# Altium footprint library LED-Optocupler$.PcbLib: 72 footprints (part 5 of 5)
Each footprint in its own frame and in the unit in brackets; x right, y up, seen from the top. Pads: shape width x height; smd on the part's side, far side on the other; paste and mask are expansions set on the pad; w line width, h text height; cw(c..) or ccw(c..) is an arc to the next point about the centre after c.
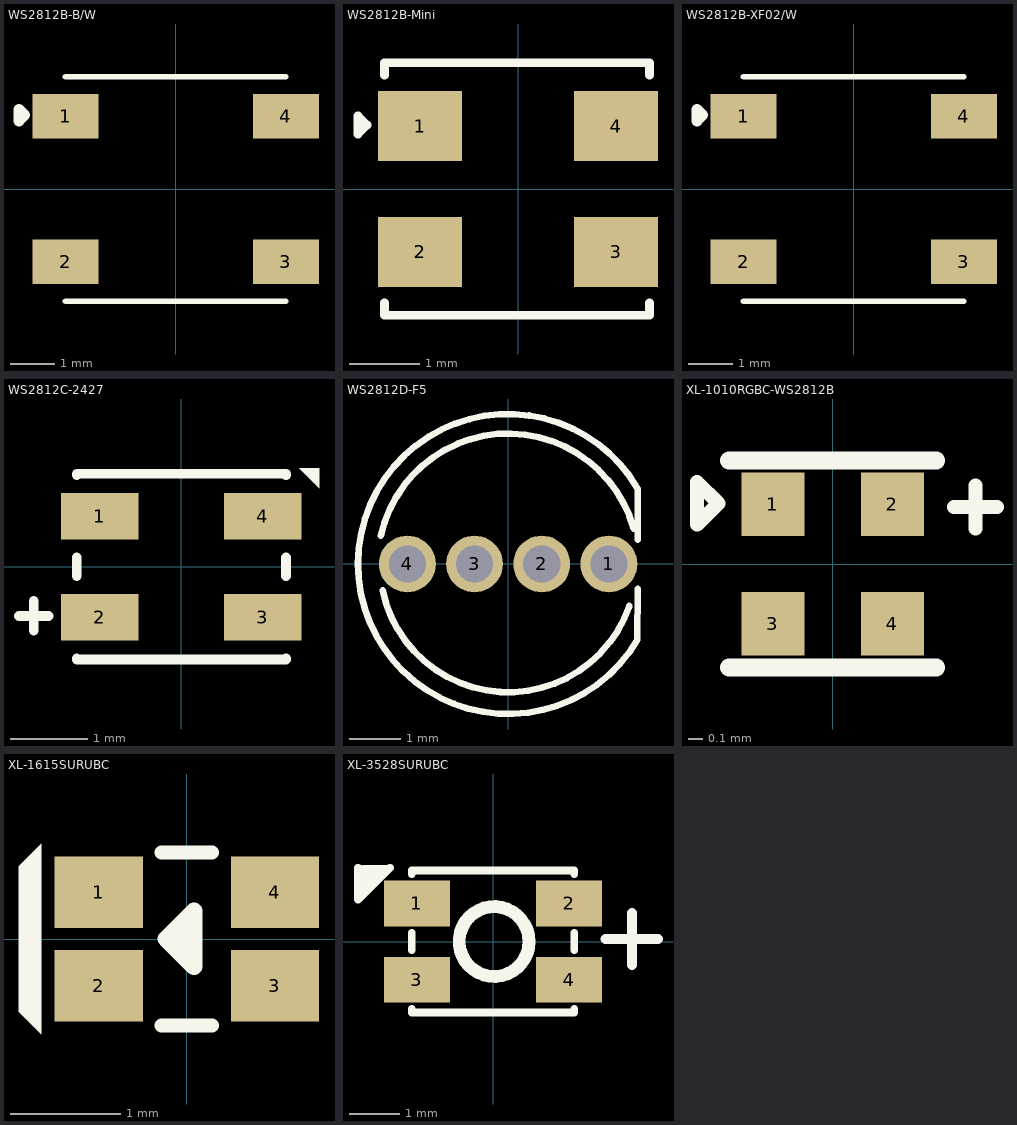
[diagram p4: the footprints below, top view; thin cyan lines are the x and y axes]

## WS2812B-B/W [mm]
pads (4):
  rect 1.5x1 smd: 1(-2.5,1.65) 2(-2.5,-1.65) 3(2.5,-1.65) 4(2.5,1.65)
Top Overlay:
  lines w0.127: -2.5,-2.551 2.5,-2.551 ; -2.5,2.551 2.5,2.551
  lines w0.254: -3.556,1.549 -3.429,1.676 -3.556,1.803 -3.556,1.549
3D body "WS2812B-BW.STEP": height 1.55, standoff -0.02, extent -2.7,-2.5 2.7,2.5

## WS2812B-Mini [mm] "SMD,3.5x3.5mm Light Emitting Diodes (LED) RoHS"
pads (4):
  rect 1.2x1 smd: 1(-1.4,0.9) 2(-1.4,-0.9) 3(1.4,-0.9) 4(1.4,0.9)
Top Overlay:
  lines w0.127: -1.905,-1.626 -1.905,-1.803 1.88,-1.803 1.88,-1.626 ; -1.905,1.626 -1.905,1.803 1.88,1.803 1.88,1.626 ; -2.286,0.787 -2.159,0.914 -2.286,1.041 -2.286,0.787
3D body "SMD WS2812B Mini.step": height 1.95, standoff 0, extent -1.84,-1.74 1.84,1.74

## WS2812B-XF02/W [mm]
pads (4):
  rect 1.5x1 smd: 1(-2.5,1.65) 2(-2.5,-1.65) 3(2.5,-1.65) 4(2.5,1.65)
Top Overlay:
  lines w0.127: -2.5,-2.551 2.5,-2.551 ; -2.5,2.551 2.5,2.551
  lines w0.254: -3.556,1.549 -3.556,1.803 -3.429,1.676 -3.556,1.549
3D body "WS2812B-BW.STEP": height 1.55, standoff -0.02, extent -2.7,-2.5 2.7,2.5

## WS2812C-2427 [mm]
pads (4):
  rect 1x0.6 smd paste+0 mask+0.051: 1(-1.05,0.65) 2(-1.05,-0.65) 3(1.05,-0.65) 4(1.05,0.65)
Top Overlay:
  region: 1.524,1.27 1.778,1.27 1.778,1.016
  lines w0.127: -2.095,-0.635 -1.714,-0.635 ; -1.905,-0.826 -1.905,-0.445 ; -1.35,-1.181 -1.35,-1.2 1.35,-1.2 1.35,-1.181 ; -1.35,-0.119 -1.35,0.119 ; -1.35,1.181 -1.35,1.2 1.35,1.2 1.35,1.181 ; 1.35,-0.119 1.35,0.119
3D body "C4154872.step": height 1.12, standoff 0, extent -1.35,-1.204 1.35,1.204

## WS2812D-F5 [mm]
pads (4):
  round 1.1 hole 0.72 paste+0 mask+0.051: 1(1.95,0) 2(0.65,0) 3(-0.65,0) 4(-1.95,0)
Top Overlay:
  lines w0.127: -2.464,0.543 cw(c0,0) 2.43,0.68 ; -2.43,-0.51 ccw(c0,0) 2.347,-0.811 ; 2.504,-0.476 2.5,-1.471 cw(c-0.003,-0.001) 2.511,1.45 2.507,0.472
3D body "C190565.step": height 8.7, standoff -3.5, extent -2.9,-2.9 2.51,2.9

## XL-1010RGBC-WS2812B [mm]
pads (4):
  rect 0.45x0.45 smd: 1(-0.425,0.425) 2(0.425,0.425) 3(-0.425,-0.425) 4(0.425,-0.425)
Top Overlay:
  lines w0.1: 0.864,0.406 1.168,0.406 ; 1.016,0.254 1.016,0.559 ; -0.965,0.279 -0.965,0.584 -0.813,0.432 -0.965,0.279
  lines w0.127: -0.737,-0.737 0.737,-0.737 ; -0.737,0.737 0.737,0.737
3D body "XL-1010RGBC-WS2812B.STEP": height 0.81, standoff 0, extent -0.5,-0.501 0.5,0.5

## XL-1615SURUBC [mm]
pads (4):
  rect 0.8x0.65 smd: 1(-0.8,0.425) 2(-0.8,-0.425) 3(0.8,-0.425) 4(0.8,0.425)
Top Overlay:
  region: 0.064,0.128 0.064,-0.252 -0.19,0.002
  region: -1.321,0.864 -1.524,0.66 -1.524,-0.66 -1.321,-0.864
  lines w0.127: -0.229,-0.787 0.229,-0.787 ; -0.229,0.787 0.229,0.787
  lines w0.152: -0.19,0.002 0.064,0.256 0.064,0.002 0.064,-0.252 -0.19,0.002
3D body "C965836.step": height 0.59, standoff 0, extent -0.849,-0.762 0.773,0.748

## XL-3528SURUBC [mm]
pads (4):
  rect 1.3x0.9 smd paste+0 mask+0.05: 1(-1.5,0.75) 2(1.5,0.75) 3(-1.5,-0.75) 4(1.5,-0.75)
Top Overlay:
  circle w0.254: c0.02,0 r0.689
  region: -2.632,0.957 -2.662,0.927 -2.662,0.829 -2.632,0.859
  region: -2.59,1 -2.09,1.5 -2.59,1.5
  lines w0.152: -2.662,1.457 -2.662,0.829 -2.032,1.457 -2.09,1.4 ; -1.6,-1.33 -1.6,-1.4 1.6,-1.4 1.6,-1.33 ; -1.6,-0.17 -1.6,0.17 ; -1.6,1.33 -1.6,1.4 1.6,1.4 1.6,1.33 ; 1.6,-0.17 1.6,0.17
  lines w0.2: 2.22,0.05 3.25,0.05 ; 2.735,-0.465 2.735,0.565
3D body "C2843811.step": height 1.9, standoff 0, extent -1.75,-1.4 1.75,1.4